# EAGLE library part 6130XX243121_613022243121 (library WR-PHD)
WR-PHD 2.54 mm Angled Dual Socket Header Article Properties Pins 4; 6; 8; 10; 12; 14; 16; 20; 22; 24; 26; 32; 34; 40; 64; 72 Material Properties Insulator Material PBT Insulator Flammability Rating UL94 V-0 Contact Material Copper Alloy Contact Plating Gold Contact Type Stamped General Information Operating Temperature -40 °C up to +105 °C Compliance Lead free / RoHS Pitch 2.54 mm Durability 25 Mating cycles Rows Dual Gender Socket Header Type Angled Electrical Properties Withstanding Voltage 500 V (AC) Contact Resistance 20 mΩ RISO 1000 MΩ CERTIFICATION UL Approval E323964 Packaging Properties Packaging Tray <https://www.we-online.com/components/media/o33216v209%20Family_WR-PHD_6130xx243121.jpg> Details see: www.we-online.com/en/components/products/PHD_2_54_ANGLED_DUAL_SOCKET_HEADER_6130XX243121 <www.we-online.com/catalog/PHD_2_54_ANGLED_DUAL_SOCKET_HEADER_6130XX243121/?utm_source=eagle_model&utm_medium=description_link&utm_campaign=eisos_eagle> Updated by Ella 2024-03-13 2024 (C) Würth Elektronik
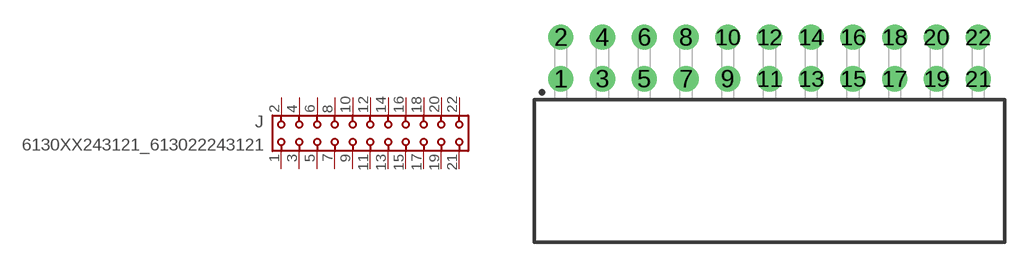
[diagram p182: symbol with the pads of 613022243121; footprint 613022243121]

Designator prefix J

## 6130XX243121_613022243121 (DATASHEET-URL: https://www.we-online.com/redexpert/spec/613022243121?ae; GENDER: Socket Header; IR: 3A; MOUNT: THT; PACKAGING: Tray; PART-NUMBER: 613022243121; PINS: 22; PITCH: 2.54 mm; ROWS: Dual; TYPE: Angled; VALUE: 613022243121)  [613022243121]
1  1  pas
2  2  pas
3  3  pas
4  4  pas
5  5  pas
6  6  pas
7  7  pas
8  8  pas
9  9  pas
10  10  pas
11  11  pas
12  12  pas
13  13  pas
14  14  pas
15  15  pas
16  16  pas
17  17  pas
18  18  pas
19  19  pas
20  20  pas
21  21  pas
22  22  pas

## Footprint 613022243121 (pad centres in mm)
WR-PHD 2.54 mm Angled Socket Header, 22 Pins
drill 1.02: 1 -12.7,5.61; 2 -12.7,8.15; 3 -10.16,5.61; 4 -10.16,8.15; 5 -7.62,5.61; 6 -7.62,8.15; 7 -5.08,5.61; 8 -5.08,8.15; 9 -2.54,5.61; 10 -2.54,8.15; 11 0,5.61; 12 0,8.15; 13 2.54,5.61; 14 2.54,8.15; 15 5.08,5.61; 16 5.08,8.15; 17 7.62,5.61; 18 7.62,8.15; 19 10.16,5.61; 20 10.16,8.15; 21 12.7,5.61; 22 12.7,8.15